# Altium footprint library LimeMicroAltiumLib.PcbLib: 876 footprints (part 54 of 57)
Each footprint in its own frame and in the unit in brackets; x right, y up, seen from the top. Pads: shape width x height; smd on the part's side, far side on the other; paste and mask are expansions set on the pad; w line width, h text height; cw(c..) or ccw(c..) is an arc to the next point about the centre after c.
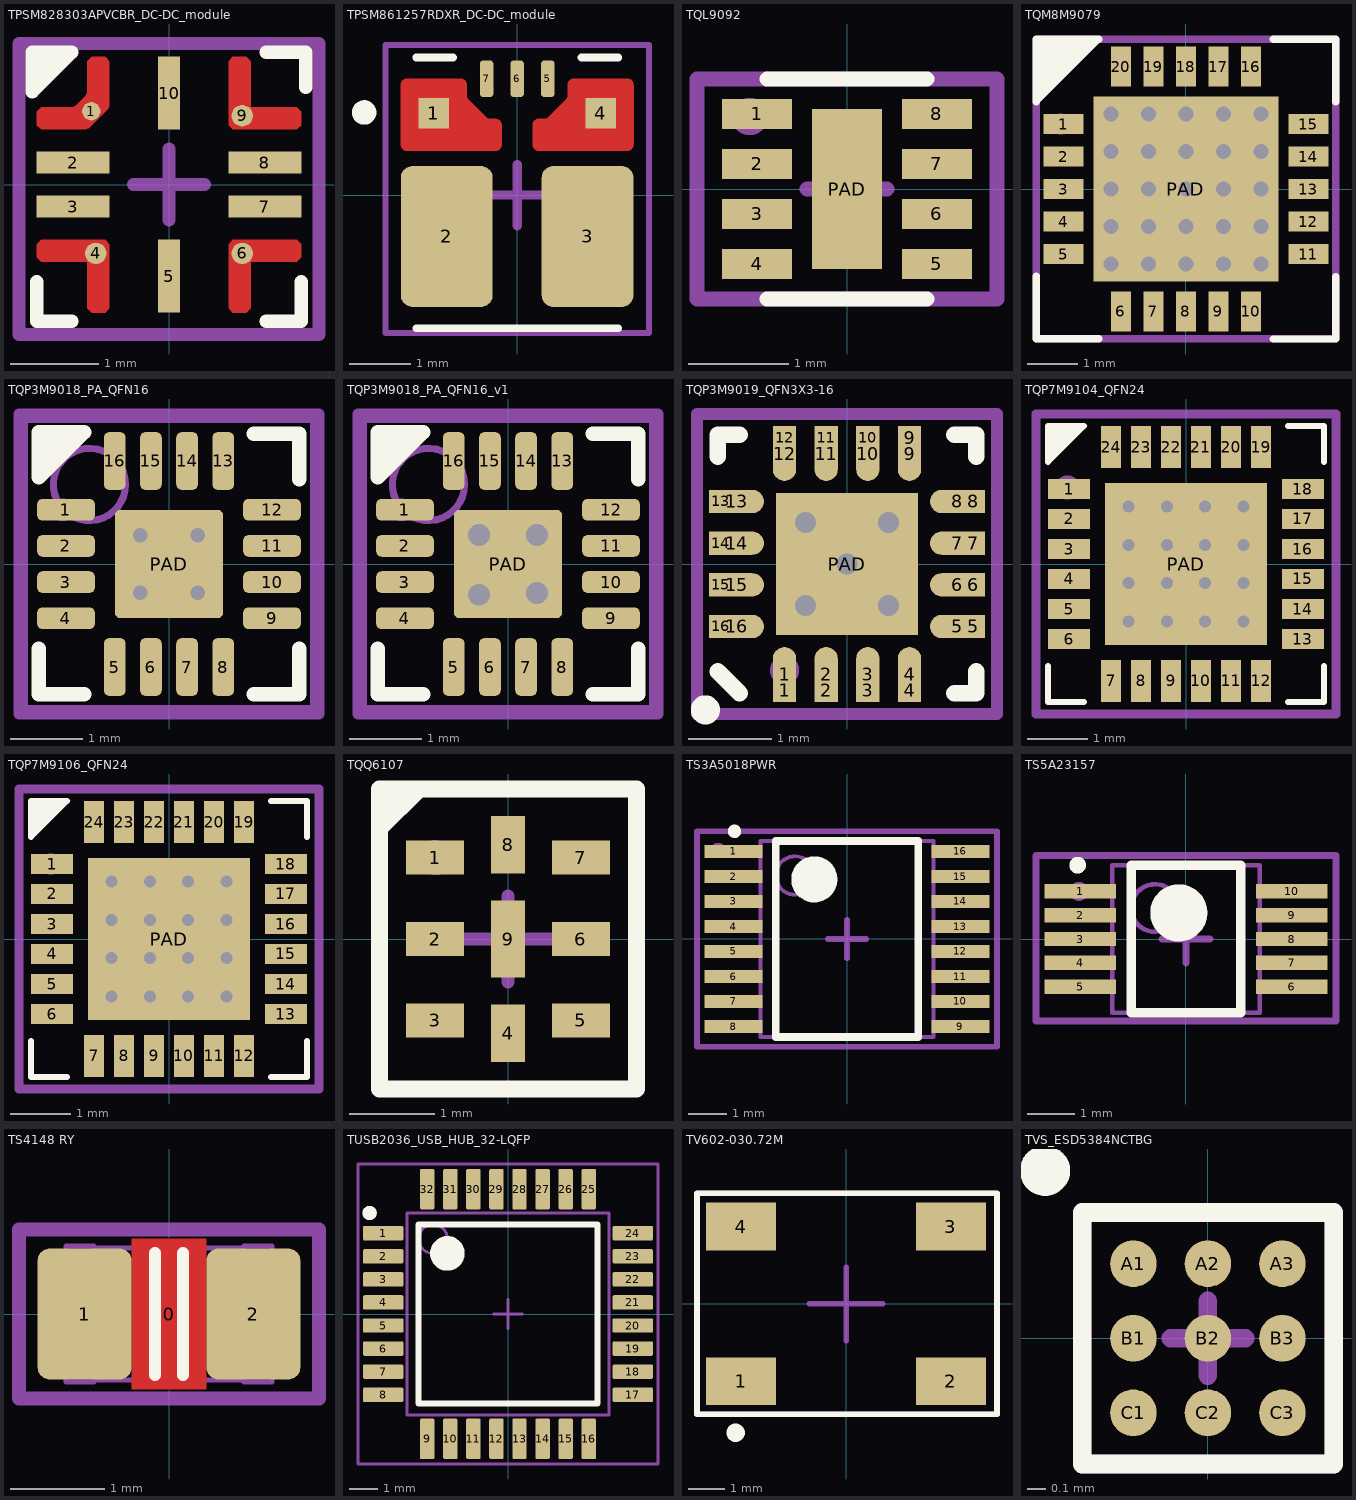
[diagram p53: the footprints below, top view; thin cyan lines are the x and y axes]

## TPSM828303APVCBR_DC-DC_module [mm]
pads (10):
  round 0.207 smd paste+0 mask+0: 1(-0.881,0.831)
  rect 0.825x0.25 smd paste+0 mask+0.05: 2(-1.088,0.25) 3(-1.088,-0.25) 7(1.088,-0.25) 8(1.088,0.25)
  round 0.243 smd paste+0 mask+0: 4(-0.83,-0.78) 6(0.83,-0.78) 9(0.83,0.78)
  rect 0.25x0.825 smd paste+0 mask+0.05: 5(0,-1.038) 10(0,1.038)
Top Layer:
  region: -0.725,-0.625 -1.45,-0.625 -1.5,-0.675 -1.5,-0.825 -1.45,-0.875 -0.925,-0.875 -0.925,-1.4 -0.875,-1.45 -0.725,-1.45 -0.675,-1.4 -0.675,-0.675
  region: 0.725,-0.625 1.45,-0.625 1.5,-0.675 1.5,-0.825 1.45,-0.875 0.925,-0.875 0.925,-1.4 0.875,-1.45 0.725,-1.45 0.675,-1.4 0.675,-0.675
  region: 0.725,0.625 1.45,0.625 1.5,0.675 1.5,0.825 1.45,0.875 0.925,0.875 0.925,1.4 0.875,1.45 0.725,1.45 0.675,1.4 0.675,0.675
  region: -0.946,0.625 -1.45,0.625 -1.5,0.675 -1.5,0.825 -1.45,0.875 -1.095,0.875 -1.058,0.891 -0.941,1.008 -0.925,1.045 -0.925,1.4 -0.875,1.45 -0.725,1.45 -0.675,1.4 -0.675,0.896 -0.691,0.859 -0.909,0.641
Top Overlay:
  region: -1.55,1.1 -1.15,1.5 -1.55,1.5
  lines w0.15: -1.5,-1.1 -1.5,-1.55 -1.1,-1.55 ; 1.1,-1.55 1.5,-1.55 1.5,-1.1 ; 1.1,1.5 1.55,1.5 1.55,1.1 ; -1.55,1.05 -1.1,1.5 -1.55,1.5 -1.55,1.05
Top Paste:
  region: 0.725,-0.625 1.45,-0.625 1.5,-0.675 1.5,-0.825 1.45,-0.875 0.925,-0.875 0.925,-1.4 0.875,-1.45 0.725,-1.45 0.675,-1.4 0.675,-0.675
  region: -0.725,-0.625 -1.45,-0.625 -1.5,-0.675 -1.5,-0.825 -1.45,-0.875 -0.925,-0.875 -0.925,-1.4 -0.875,-1.45 -0.725,-1.45 -0.675,-1.4 -0.675,-0.675
  region: 0.725,0.625 1.45,0.625 1.5,0.675 1.5,0.825 1.45,0.875 0.925,0.875 0.925,1.4 0.875,1.45 0.725,1.45 0.675,1.4 0.675,0.675
  region: -0.946,0.625 -1.45,0.625 -1.5,0.675 -1.5,0.825 -1.45,0.875 -1.095,0.875 -1.058,0.891 -0.941,1.008 -0.925,1.045 -0.925,1.4 -0.875,1.45 -0.725,1.45 -0.675,1.4 -0.675,0.896 -0.691,0.859 -0.909,0.641
Top Solder:
  region: -0.7,-0.575 -1.45,-0.575 -1.55,-0.675 -1.55,-0.825 -1.45,-0.925 -0.975,-0.925 -0.975,-1.4 -0.875,-1.5 -0.725,-1.5 -0.625,-1.4 -0.625,-0.65
  region: 0.725,0.625 1.45,0.625 1.5,0.675 1.5,0.825 1.45,0.875 0.925,0.875 0.925,1.4 0.875,1.45 0.725,1.45 0.675,1.4 0.675,0.675
  region: -0.946,0.625 -1.45,0.625 -1.5,0.675 -1.5,0.825 -1.45,0.875 -1.095,0.875 -1.058,0.891 -0.941,1.008 -0.925,1.045 -0.925,1.4 -0.875,1.45 -0.725,1.45 -0.675,1.4 -0.675,0.896 -0.691,0.859 -0.909,0.641
  region: 0.7,-0.575 1.45,-0.575 1.55,-0.675 1.55,-0.825 1.45,-0.925 0.975,-0.925 0.975,-1.4 0.875,-1.5 0.725,-1.5 0.625,-1.4 0.625,-0.65
  region: 0.625,0.65 0.625,1.4 0.725,1.5 0.875,1.5 0.975,1.4 0.975,0.925 1.45,0.925 1.55,0.825 1.55,0.675 1.45,0.575 0.7,0.575
  region: -0.854,0.57 -1.445,0.57 -1.545,0.67 -1.545,0.83 -1.455,0.92 -1.095,0.92 -0.97,1.045 -0.97,1.43 -0.905,1.495 -0.72,1.495 -0.62,1.395 -0.62,0.804
Mechanical 15:
  lines w0.15: -0.4,0 0,0 ; 0,-0.4 0,0 ; 0,0.4 0,0 ; 0.4,0 0,0 ; -1.7,-1.7 -1.7,1.6 1.7,1.6 1.7,-1.7 -1.7,-1.7
  text ".Designator" at 0,0 h0.55
  text "1" at -1.3,0.8 h0.4
  text "4" at -1.2,-1.3 h0.4
  text "6" at 0.9,-1.3 h0.4
  text "9" at 0.9,0.8 h0.4
3D body "TPSM828303APVCBR.stp": height 1.95, standoff 0, extent -1.31,-1.259 1.31,1.26

## TPSM861257RDXR_DC-DC_module [mm]
pads (7):
  rect 0.5x0.5 smd paste-1 mask+0: 1(-1.362,1.338) 4(1.362,1.338)
  rrect25% 1.5x2.3 smd paste-1 mask+0: 2(-1.15,-0.675) 3(1.15,-0.675)
  rrect50% 0.22x0.6 smd mask+0: 5(0.5,1.9) 6(0,1.9) 7(-0.5,1.9)
Top Layer:
  region: 204 vertices and 0 holes, not listed, extent 0.255,0.725 1.9,1.9
  region: 204 vertices and 0 holes, not listed, extent -1.9,0.725 -0.255,1.9
Top Overlay:
  circle w0.2: c-2.5,1.35 r0.1
  lines w0.127: -1.65,-2.175 1.65,-2.175 ; -1.65,2.25 -1.05,2.25 ; 1.05,2.25 1.65,2.25
Top Paste:
  drawing of 8 lines, arcs and shapes, not listed
Top Solder:
  drawing of 7 lines, arcs and shapes, not listed
Mechanical 15:
  lines w0.1: -2.15,-2.25 -2.15,2.45 2.15,2.45 2.15,-2.25 -2.15,-2.25
  lines w0.15: -0.5,0 0,0 ; 0,-0.5 0,0 ; 0,0.5 0,0 ; 0.5,0 0,0
  text "4" at 1.3,1.175 h0.4
  text "3" at 1.15,-1.55 h0.4
  text "2" at -1.325,-1.55 h0.4
  text "1" at -1.425,1.15 h0.4
  text ".Designator" at 0,0 h0.55
3D body "step_temp.STEP": height 2.1, standoff 0, extent -1.65,-2 1.65,2

## TQL9092 [mm]
pads (9):
  rect 0.7x0.3 smd mask+0.05: 1(-0.9,0.75) 2(-0.9,0.25) 3(-0.9,-0.25) 4(-0.9,-0.75) 5(0.9,-0.75) 6(0.9,-0.25) 7(0.9,0.25) 8(0.9,0.75)
  rect 0.7x1.6 smd mask+0.05: PAD(0,0)
Top Overlay:
  lines w0.15: -0.8,-1.1 0.8,-1.1 ; -0.8,1.1 0.8,1.1
Mechanical 15:
  circle w0.3: c-0.975,0.725 r0.035
  lines w0.15: -0.4,0 0.4,0 ; 0,-0.4 0,0.4 ; -1.5,-1.1 1.5,-1.1 1.5,1.1 -1.5,1.1 -1.5,-1.1
  text ".Designator" at 0,0 h0.55

## TQM8M9079 [mm]
pads (21):
  rect 0.8x0.4 smd mask+0.05: 1(-2.45,1.3) 2(-2.45,0.65) 3(-2.45,0) 4(-2.45,-0.65) 5(-2.45,-1.3) 11(2.45,-1.3) 12(2.45,-0.65) 13(2.45,0) 14(2.45,0.65) 15(2.45,1.3)
  rect 0.4x0.8 smd mask+0.05: 6(-1.3,-2.45) 7(-0.65,-2.45) 8(0,-2.45) 9(0.65,-2.45) 10(1.3,-2.45) 16(1.3,2.45) 17(0.65,2.45) 18(0,2.45) 19(-0.65,2.45) 20(-1.3,2.45)
  rect 3.7x3.7 smd mask+0.05: PAD(0,0)
via -1.5,1.5 diameter 0.6 hole 0.3
via -1.5,0.75 diameter 0.6 hole 0.3
via -1.5,0 diameter 0.6 hole 0.3
via -1.5,-0.75 diameter 0.6 hole 0.3
via -1.5,-1.5 diameter 0.6 hole 0.3
via 1.5,1.5 diameter 0.6 hole 0.3
via 1.5,0.75 diameter 0.6 hole 0.3
via 1.5,0 diameter 0.6 hole 0.3
via 1.5,-0.75 diameter 0.6 hole 0.3
via 1.5,-1.5 diameter 0.6 hole 0.3
via 0.75,1.5 diameter 0.6 hole 0.3
via 0.75,0.75 diameter 0.6 hole 0.3
via 0.75,0 diameter 0.6 hole 0.3
via 0.75,-0.75 diameter 0.6 hole 0.3
via 0.75,-1.5 diameter 0.6 hole 0.3
via 0,1.5 diameter 0.6 hole 0.3
via 0,0.75 diameter 0.6 hole 0.3
via 0,0 diameter 0.6 hole 0.3
via 0,-0.75 diameter 0.6 hole 0.3
via 0,-1.5 diameter 0.6 hole 0.3
via -0.75,1.5 diameter 0.6 hole 0.3
via -0.75,0.75 diameter 0.6 hole 0.3
via -0.75,0 diameter 0.6 hole 0.3
via -0.75,-0.75 diameter 0.6 hole 0.3
via -0.75,-1.5 diameter 0.6 hole 0.3
Top Overlay:
  region: -3,1.75 -1.75,3 -3,3
  lines w0.15: -3,-1.75 -3,-3 -1.75,-3 ; 1.75,-3 3,-3 3,-1.75 ; 1.75,3 3,3 3,1.75 ; -3,1.75 -1.75,3 -3,3 -3,1.75
Mechanical 15:
  circle w0.3: c-2.5,1.3 r0.056
  lines w0.15: -0.5,0 0.5,0 ; 0,-0.5 0,0.5 ; -3,-3 -3,3 3,3 3,-3 -3,-3
  text ".Designator" at 0,0 h0.55
3D body: height 1, standoff 0, extent -2.5,-2.5 2.5,2.5
3D body: height 1.01, standoff 0, extent -2.298,1.701 -1.7,2.3

## TQP3M9018_PA_QFN16 [mm]
pads (17):
  rrect50% 0.8x0.3 smd mask+0.05: 1(-1.425,0.75) 2(-1.425,0.25) 3(-1.425,-0.25) 4(-1.425,-0.75) 9(1.425,-0.75) 10(1.425,-0.25) 11(1.425,0.25) 12(1.425,0.75)
  rrect50% 0.3x0.8 smd mask+0.05: 5(-0.75,-1.425) 6(-0.25,-1.425) 7(0.25,-1.425) 8(0.75,-1.425) 13(0.75,1.425) 14(0.25,1.425) 15(-0.25,1.425) 16(-0.75,1.425)
  rrect10% 1.5x1.5 smd mask+0.05: PAD(0,0)
via -0.4,-0.4 diameter 0.4 hole 0.2
via 0.4,-0.4 diameter 0.4 hole 0.2
via 0.4,0.4 diameter 0.4 hole 0.2
via -0.4,0.4 diameter 0.4 hole 0.2
Top Overlay:
  region: -1.8,1.1 -1.075,1.825 -1.8,1.825
  lines w0.2: -1.8,-1.175 -1.8,-1.8 -1.175,-1.8 ; 1.175,-1.8 1.8,-1.8 1.8,-1.175 ; 1.175,1.8 1.8,1.8 1.8,1.175 ; -1.8,1.2 -1.8,1.825 -1.175,1.825 -1.8,1.2
Mechanical 13:
  circle w0.1: c-1.1,1.1 r0.5
  lines w0.1: -2,-2 2,-2 2,2 -2,2 -2,-2
Mechanical 15:
  circle w0.2: c-1.475,0.75 r0.056
  lines w0.15: -0.5,0 0.5,0 ; 0,-0.5 0,0.5 ; -2.075,-2.075 2.075,-2.075 2.075,2.075 -2.075,2.075 -2.075,-2.075
  text ".Designator" at 0,0 h0.55
3D body "User Library-qfn16-3x3.step": height 0.92, standoff 0, extent -1.5,-1.5 1.5,1.5

## TQP3M9018_PA_QFN16_v1 [mm]
pads (17):
  rrect50% 0.8x0.3 smd mask+0.05: 1(-1.425,0.75) 2(-1.425,0.25) 3(-1.425,-0.25) 4(-1.425,-0.75) 9(1.425,-0.75) 10(1.425,-0.25) 11(1.425,0.25) 12(1.425,0.75)
  rrect50% 0.3x0.8 smd mask+0.05: 5(-0.75,-1.425) 6(-0.25,-1.425) 7(0.25,-1.425) 8(0.75,-1.425) 13(0.75,1.425) 14(0.25,1.425) 15(-0.25,1.425) 16(-0.75,1.425)
  rrect10% 1.5x1.5 smd mask+0.05: PAD(0,0)
via -0.4,-0.425 diameter 0.6 hole 0.3
via 0.4,-0.4 diameter 0.6 hole 0.3
via 0.4,0.4 diameter 0.6 hole 0.3
via -0.4,0.4 diameter 0.6 hole 0.3
Top Overlay:
  region: -1.8,1.1 -1.075,1.825 -1.8,1.825
  lines w0.2: -1.8,-1.175 -1.8,-1.8 -1.175,-1.8 ; 1.175,-1.8 1.8,-1.8 1.8,-1.175 ; 1.175,1.8 1.8,1.8 1.8,1.175 ; -1.8,1.2 -1.175,1.825 -1.8,1.825 -1.8,1.2
Mechanical 13:
  circle w0.1: c-1.1,1.1 r0.5
  lines w0.1: -2,-2 -2,2 2,2 2,-2 -2,-2
Mechanical 15:
  circle w0.2: c-1.475,0.75 r0.056
  lines w0.15: -0.5,0 0.5,0 ; 0,-0.5 0,0.5 ; -2.075,-2.075 -2.075,2.075 2.075,2.075 2.075,-2.075 -2.075,-2.075
  text ".Designator" at 0,0 h0.55
3D body "User Library-qfn16-3x3.step": height 0.92, standoff 0, extent -1.5,-1.5 1.5,1.5

## TQP3M9019_QFN3X3-16 [mm] "Quad Flat No Lead, Plastic; 16 Terminals; Body 3 x 3 mm; Pitch 0.5 mm"
height 0.8
pads (33):
  rect 0.28x0.28 smd mask+0.05: 1(-0.75,-1.515) 2(-0.25,-1.515) 3(0.25,-1.515) 4(0.75,-1.515) 5(1.515,-0.75) 6(1.515,-0.25) 7(1.515,0.25) 8(1.515,0.75) 9(0.75,1.515) 10(0.25,1.515) 11(-0.25,1.515) 12(-0.75,1.515) 13(-1.515,0.75) 14(-1.515,0.25) 15(-1.515,-0.25) 16(-1.515,-0.75)
  oval 0.28x0.66 smd mask+0.05: 1(-0.75,-1.325) 2(-0.25,-1.325) 3(0.25,-1.325) 4(0.75,-1.325) 9(0.75,1.325) 10(0.25,1.325) 11(-0.25,1.325) 12(-0.75,1.325)
  oval 0.66x0.28 smd mask+0.05: 5(1.325,-0.75) 6(1.325,-0.25) 7(1.325,0.25) 8(1.325,0.75) 13(-1.325,0.75) 14(-1.325,0.25) 15(-1.325,-0.25) 16(-1.325,-0.75)
  rect 1.7x1.7 smd paste-0.25 mask+0.05: PAD(0,0)
via 0,0 diameter 0.5 hole 0.25
via -0.5,0.5 diameter 0.5 hole 0.25
via 0.5,0.5 diameter 0.5 hole 0.25
via 0.5,-0.5 diameter 0.5 hole 0.25
via -0.5,-0.5 diameter 0.5 hole 0.25
Top Overlay:
  circle w0.25: c-1.7,-1.75 r0.05
  lines w0.2: -1.55,-1.29 -1.29,-1.55 ; -1.55,1.29 -1.55,1.55 -1.29,1.55 ; 1.29,-1.55 1.55,-1.55 1.55,-1.29 ; 1.29,1.55 1.55,1.55 1.55,1.29
Mechanical 15:
  circle w0.3: c-0.75,-1.275 r0.025
  lines w0.15: -0.475,0 0,0 ; 0,-0.475 0,0 ; 0,0.475 0,0 ; 0.475,0 0,0 ; -1.8,-1.8 -1.8,1.8 1.8,1.8 1.8,-1.8 -1.8,-1.8
  text ".Designator" at 0,0 h0.55
3D body "User Library-QFN16-1.step": height 0.89, standoff 0, extent -1.55,-1.55 1.55,1.55

## TQP7M9104_QFN24 [mm]
pads (25):
  rect 0.7x0.34 smd mask+0.05: 1(-1.95,1.25) 2(-1.95,0.75) 3(-1.95,0.25) 4(-1.95,-0.25) 5(-1.95,-0.75) 6(-1.95,-1.25) 13(1.95,-1.25) 14(1.95,-0.75) 15(1.95,-0.25) 16(1.95,0.25) 17(1.95,0.75) 18(1.95,1.25)
  rect 0.34x0.7 smd mask+0.05: 7(-1.25,-1.95) 8(-0.75,-1.95) 9(-0.25,-1.95) 10(0.25,-1.95) 11(0.75,-1.95) 12(1.25,-1.95) 19(1.25,1.95) 20(0.75,1.95) 21(0.25,1.95) 22(-0.25,1.95) 23(-0.75,1.95) 24(-1.25,1.95)
  rect 2.7x2.7 smd mask+0.05: PAD(0,0)
via -0.96,-0.32 diameter 0.4 hole 0.2
via -0.32,-0.32 diameter 0.4 hole 0.2
via -0.32,-0.96 diameter 0.4 hole 0.2
via -0.96,-0.96 diameter 0.4 hole 0.2
via 0.32,-0.96 diameter 0.4 hole 0.2
via 0.32,-0.32 diameter 0.4 hole 0.2
via 0.96,-0.96 diameter 0.4 hole 0.2
via 0.96,-0.32 diameter 0.4 hole 0.2
via 0.96,0.32 diameter 0.4 hole 0.2
via 0.32,0.32 diameter 0.4 hole 0.2
via -0.32,0.32 diameter 0.4 hole 0.2
via -0.96,0.32 diameter 0.4 hole 0.2
via 0.96,0.96 diameter 0.4 hole 0.2
via 0.32,0.96 diameter 0.4 hole 0.2
via -0.32,0.96 diameter 0.4 hole 0.2
via -0.96,0.96 diameter 0.4 hole 0.2
Top Overlay:
  region: -2.3,2.3 -1.65,2.3 -2.3,1.65
  lines w0.1: -2.3,-1.7 -2.3,-2.3 -1.7,-2.3 ; 1.7,-2.3 2.3,-2.3 2.3,-1.7 ; 1.7,2.3 2.3,2.3 2.3,1.7 ; -2.3,1.7 -1.7,2.3 -2.3,2.3 -2.3,1.7
Mechanical 15:
  circle w0.3: c-1.975,1.275 r0.05
  lines w0.15: -0.2,0 0.2,0 ; 0,-0.2 0,0.2 ; -2.5,-2.5 2.5,-2.5 2.5,2.5 -2.5,2.5 -2.5,-2.5
  text ".Designator" at 0,0 h0.55
3D body "User Library-QFN 24 4x4.step": height 0.9, standoff 0, extent -2.002,-2.002 2.002,2.002

## TQP7M9106_QFN24 [mm]
pads (25):
  rect 0.7x0.34 smd mask+0.05: 1(-1.95,1.25) 2(-1.95,0.75) 3(-1.95,0.25) 4(-1.95,-0.25) 5(-1.95,-0.75) 6(-1.95,-1.25) 13(1.95,-1.25) 14(1.95,-0.75) 15(1.95,-0.25) 16(1.95,0.25) 17(1.95,0.75) 18(1.95,1.25)
  rect 0.34x0.7 smd mask+0.05: 7(-1.25,-1.95) 8(-0.75,-1.95) 9(-0.25,-1.95) 10(0.25,-1.95) 11(0.75,-1.95) 12(1.25,-1.95) 19(1.25,1.95) 20(0.75,1.95) 21(0.25,1.95) 22(-0.25,1.95) 23(-0.75,1.95) 24(-1.25,1.95)
  rect 2.7x2.7 smd mask+0.05: PAD(0,0)
via -0.96,0.96 diameter 0.4 hole 0.2
via -0.32,0.96 diameter 0.4 hole 0.2
via 0.32,0.96 diameter 0.4 hole 0.2
via 0.96,0.96 diameter 0.4 hole 0.2
via -0.96,0.32 diameter 0.4 hole 0.2
via -0.32,0.32 diameter 0.4 hole 0.2
via 0.32,0.32 diameter 0.4 hole 0.2
via 0.96,0.32 diameter 0.4 hole 0.2
via 0.96,-0.32 diameter 0.4 hole 0.2
via 0.96,-0.96 diameter 0.4 hole 0.2
via 0.32,-0.32 diameter 0.4 hole 0.2
via 0.32,-0.96 diameter 0.4 hole 0.2
via -0.96,-0.96 diameter 0.4 hole 0.2
via -0.32,-0.96 diameter 0.4 hole 0.2
via -0.32,-0.32 diameter 0.4 hole 0.2
via -0.96,-0.32 diameter 0.4 hole 0.2
Top Overlay:
  region: -2.3,2.3 -1.65,2.3 -2.3,1.65
  lines w0.1: -2.3,-1.7 -2.3,-2.3 -1.7,-2.3 ; 1.7,-2.3 2.3,-2.3 2.3,-1.7 ; 1.7,2.3 2.3,2.3 2.3,1.7 ; -2.3,1.7 -1.7,2.3 -2.3,2.3 -2.3,1.7
Mechanical 15:
  circle w0.3: c-1.975,1.25 r0.025
  lines w0.15: -0.2,0 0.2,0 ; 0,-0.2 0,0.2 ; -2.5,-2.5 -2.5,2.5 2.5,2.5 2.5,-2.5 -2.5,-2.5
  text ".Designator" at 0,0 h0.55
3D body "User Library-QFN 24 4x4.step": height 0.9, standoff 0, extent -2.002,-2.002 2.002,2.002

## TQQ6107 [mm]
pads (9):
  rect 0.675x0.4 smd mask+0.05: 1(-0.85,0.95) 2(-0.85,0) 3(-0.85,-0.95) 5(0.85,-0.95) 6(0.85,0) 7(0.85,0.95)
  rect 0.4x0.675 smd mask+0.05: 4(0,-1.1) 8(0,1.1)
  rect 0.4x0.9 smd mask+0.05: 9(0,0)
Top Overlay:
  region: -1.5,1.75 -1.5,1.15 -0.9,1.75
  lines w0.2: -1.5,-1.75 -1.5,1.75 1.5,1.75 1.5,-1.75 -1.5,-1.75
Mechanical 15:
  circle w0.2: c-0.85,0.95 r0.103
  lines w0.15: -0.5,0 0.5,0 ; 0,-0.5 0,0.5 ; -1.5,-1.75 1.5,-1.75 1.5,1.75 -1.5,1.75 -1.5,-1.75
  text ".Designator" at 0,0 h0.55
3D body: height 0.98, standoff 0, extent -1,-1.25 1,1.25
3D body: height 0.99, standoff 0, extent -0.8,0.75 -0.501,1.049

## TS3A5018PWR [mm] "TSOP, 16-Leads, Body 5,00x4,40mm, Pitch 0,65mm, IPC Medium Density"
height 1.2
pads (16):
  rect 1.5x0.35 smd mask+0.07: 1(-2.95,2.275) 2(-2.95,1.625) 3(-2.95,0.975) 4(-2.95,0.325) 5(-2.95,-0.325) 6(-2.95,-0.975) 7(-2.95,-1.625) 8(-2.95,-2.275) 9(2.95,-2.275) 10(2.95,-1.625) 11(2.95,-0.975) 12(2.95,-0.325) 13(2.95,0.325) 14(2.95,0.975) 15(2.95,1.625) 16(2.95,2.275)
Top Overlay:
  circle w0.25: c-2.925,2.8 r0.05
  circle w0.6: c-0.85,1.55 r0.3
  lines w0.2: -1.85,-2.55 -1.85,2.55 1.85,2.55 1.85,-2.55 -1.85,-2.55
Mechanical 13:
  circle w0.1: c-1.35,1.65 r0.5
  lines w0.1: -2.25,-2.55 -2.25,2.55 2.25,2.55 2.25,-2.55 -2.25,-2.55
Mechanical 15:
  circle w0.35: c-3.35,2.3 r0.025
  lines w0.15: -0.5,0 0.5,0 ; 0,-0.5 0,0.5 ; -3.9,-2.8 -3.9,2.8 3.9,2.8 3.9,-2.8 -3.9,-2.8
  text ".Designator" at 0,0 h0.55
3D body "User Library-TSSOP-16-1.step": height 1.1, standoff 0, extent -3.2,-2.5 3.2,2.5

## TS5A23157 [mm] "TSSOP, 10-Leads, Body 3,00x3,00mm, Pitch 0,50mm, IPC Medium Density"
height 1.1
pads (10):
  rect 1.5x0.3 smd mask+0.05: 1(-2.225,1) 2(-2.225,0.5) 3(-2.225,0) 4(-2.225,-0.5) 5(-2.225,-1) 6(2.225,-1) 7(2.225,-0.5) 8(2.225,0) 9(2.225,0.5) 10(2.225,1)
Top Overlay:
  circle w0.6: c-0.15,0.55 r0.3
  circle w0.25: c-2.275,1.55 r0.05
  lines w0.2: -1.15,-1.55 1.15,-1.55 1.15,1.55 -1.15,1.55 -1.15,-1.55
Mechanical 13:
  circle w0.1: c-0.65,0.65 r0.5
  lines w0.1: -1.55,-1.55 1.55,-1.55 1.55,1.55 -1.55,1.55 -1.55,-1.55
Mechanical 15:
  circle w0.2: c-2.25,1 r0.1
  lines w0.15: -0.5,0 0.5,0 ; 0,-0.5 0,0.5 ; -3.15,-1.725 3.15,-1.725 3.15,1.75 -3.15,1.75 -3.15,-1.725
  text ".Designator" at 0,0 h0.55
3D body: height 1.1, standoff 0.1, extent -1.55,-1.55 1.55,1.55
3D body "User Library-MSOP-10-1.step": height 1.05, standoff 0, extent -2.514,-1.5 2.514,1.5

## TS4148 RY [mm] "Chip Capacitor, Body 2.0x1.2mm, 0805, IPC Medium Density"
height 1.2
pads (3):
  round 0.254 on Mech15: 0(0,0)
  rrect25% 1x1.4 smd: 1(-0.9,0) 2(0.9,0)
Top Layer:
  pour cut-out: -0.4,0.8 0.4,0.8 0.4,-0.8 -0.4,-0.8
Top Overlay:
  lines w0.127: -0.15,-0.651 -0.15,0.651 ; 0.15,-0.651 0.15,0.651
Mechanical 13:
  lines w0.05: -0.8,-0.705 0.8,-0.705 ; -0.8,0.705 0.8,0.705 ; -1.1,-0.725 -1.1,0.725 -0.8,0.725 -0.8,-0.725 -1.1,-0.725 ; 0.8,-0.725 1.1,-0.725 1.1,0.725 0.8,0.725 0.8,-0.725
Mechanical 15:
  lines w0.15: -1.6,-0.9 -1.6,0.9 1.6,0.9 1.6,-0.9 -1.6,-0.9
  text ".Designator" at 0,0 h0.55
3D body "CAP_0805.STEP": height 1.34, standoff -0.01, extent -1.1,-0.725 1.1,0.725

## TUSB2036_USB_HUB_32-LQFP [mm]
pads (32):
  rrect20% 1.4x0.5 smd mask+0.05: 1(-4.325,2.8) 2(-4.325,2) 3(-4.325,1.2) 4(-4.325,0.4) 5(-4.325,-0.4) 6(-4.325,-1.2) 7(-4.325,-2) 8(-4.325,-2.8) 17(4.325,-2.8) 18(4.325,-2) 19(4.325,-1.2) 20(4.325,-0.4) 21(4.325,0.4) 22(4.325,1.2) 23(4.325,2) 24(4.325,2.8)
  rrect20% 0.5x1.4 smd mask+0.05: 9(-2.8,-4.325) 10(-2,-4.325) 11(-1.2,-4.325) 12(-0.4,-4.325) 13(0.4,-4.325) 14(1.2,-4.325) 15(2,-4.325) 16(2.8,-4.325) 25(2.8,4.325) 26(2,4.325) 27(1.2,4.325) 28(0.4,4.325) 29(-0.4,4.325) 30(-1.2,4.325) 31(-2,4.325) 32(-2.8,4.325)
Top Overlay:
  circle w0.25: c-4.8,3.5 r0.125
  circle w0.6: c-2.1,2.1 r0.3
  lines w0.2: -3.1,-3.1 -3.1,3.1 3.1,3.1 3.1,-3.1 -3.1,-3.1
Mechanical 13:
  circle w0.1: c-2.6,2.6 r0.5
  lines w0.1: -3.5,-3.5 -3.5,3.5 3.5,3.5 3.5,-3.5 -3.5,-3.5
Mechanical 15:
  circle w0.2: c-4.3,2.8 r0.1
  lines w0.1: -0.5,0 0.5,0 ; 0,-0.5 0,0.5 ; -5.2,-5.2 -5.2,5.2 5.2,5.2 5.2,-5.2 -5.2,-5.2
  text ".Designator" at 0,0 h0.55
3D body "VF0032A.stp": height 1.6, standoff 0, extent -4.505,-4.505 4.506,4.506

## TV602-030.72M [mm] "TV602-030.72M Connor Winfield"
pads (4):
  rect 1.9x1.3 smd mask+0.05: 1(-2.85,-2.1) 2(2.85,-2.1) 3(2.85,2.1) 4(-2.85,2.1)
Top Overlay:
  circle w0.3: c-3,-3.5 r0.1
  lines w0.15: -4.05,-3 4.1,-3 4.1,3 -4.05,3 -4.05,-3
Mechanical 15:
  circle w0.3: c-2.85,-2.1 r0.1
  lines w0.15: -1,0 0,0 ; 0,-1 0,0 ; 0,1 0,0 ; 1,0 0,0 ; -4.05,-3 -4.05,3 4.1,3 4.1,-3 -4.05,-3
  text ".Designator" at 0,0 h0.55

## TVS_ESD5384NCTBG [mm]
pads (9):
  round 0.25 smd mask+0.05: A1(-0.4,0.4) A2(0,0.4) A3(0.4,0.4) B1(-0.4,0) B2(0,0) B3(0.4,0) C1(-0.4,-0.4) C2(0,-0.4) C3(0.4,-0.4)
Top Overlay:
  circle w0.2: c-0.875,0.9 r0.035
  lines w0.1: -0.675,-0.675 -0.675,0.675 0.675,0.675 0.675,-0.675 -0.675,-0.675
Top Solder:
  region: -0.575,0.575 -0.575,-0.575 0.575,-0.575 0.575,0.575
Mechanical 15:
  lines w0.1: -0.2,0 0,0 ; 0,-0.2 0,0 ; 0,0.2 0,0 ; 0.2,0 0,0 ; -0.675,-0.675 -0.675,0.675 0.675,0.675 0.675,-0.675 -0.675,-0.675
  text "A1" at -0.525,-0.05 h0.25
  text "C3" at 0.05,-0.575 h0.25
  text ".Designator" at 0,0 h0.55
3D body: height 0.58, standoff 0, extent -0.5,0.3 -0.3,0.5
3D body: height 0.57, standoff 0, extent -0.57,-0.57 0.57,0.57